# Altium footprint library TCA4307DGKR.PcbLib: 3 footprints
Each footprint in its own frame and in the unit in brackets; x right, y up, seen from the top. Pads: shape width x height; smd on the part's side, far side on the other; paste and mask are expansions set on the pad; w line width, h text height; cw(c..) or ccw(c..) is an arc to the next point about the centre after c.
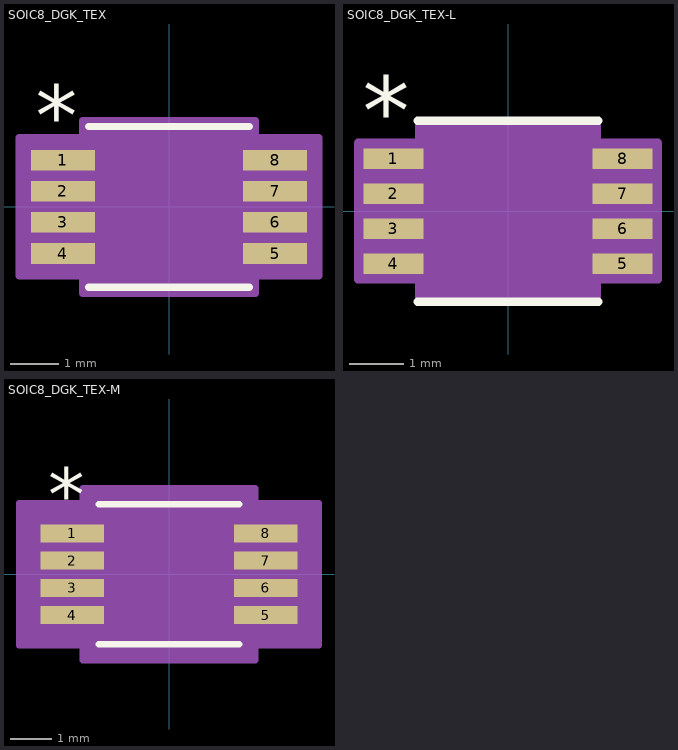
[diagram p0: the footprints below, top view; thin cyan lines are the x and y axes]

## SOIC8_DGK_TEX [mm]
pads (8):
  rect 1.328x0.431 smd paste+0 mask+0: 1(-2.213,0.975) 2(-2.213,0.325) 3(-2.213,-0.325) 4(-2.213,-0.975) 5(2.213,-0.975) 6(2.213,-0.325) 7(2.213,0.325) 8(2.213,0.975)
Top Overlay:
  lines w0.152: -1.676,-1.676 1.676,-1.676 ; -1.676,1.676 1.676,1.676
  text ".Designator" at -3.492,-0.635 h1.27
  text "*" at -2.785,1.279 h1.27
Mechanical 13:
  lines w0.025: -0.305,1.549 ccw(c0,1.549) 0.305,1.549 ; -2.527,-1.165 -2.527,-0.784 -1.549,-0.784 -1.549,-1.165 -2.527,-1.165 ; -2.527,-0.515 -2.527,-0.134 -1.549,-0.134 -1.549,-0.515 -2.527,-0.515 ; -2.527,0.134 -2.527,0.515 -1.549,0.515 -1.549,0.134 -2.527,0.134 ; -2.527,0.784 -2.527,1.165 -1.549,1.165 -1.549,0.784 -2.527,0.784 ; -1.549,-1.549 1.549,-1.549 1.549,1.549 -1.549,1.549 -1.549,-1.549 ; 1.549,-1.165 1.549,-0.784 2.527,-0.784 2.527,-1.165 1.549,-1.165 ; 1.549,-0.515 1.549,-0.134 2.527,-0.134 2.527,-0.515 1.549,-0.515 ; 1.549,0.134 1.549,0.515 2.527,0.515 2.527,0.134 1.549,0.134 ; 1.549,0.784 1.549,1.165 2.527,1.165 2.527,0.784 1.549,0.784
  text "*" at -1.486,0.203 h1.27
  text ".Designator" at -3.492,-0.635 h1.27
Mechanical 15:
  region: -1.803,-1.444 -3.131,-1.444 -3.131,1.444 -1.803,1.444 -1.803,1.803 1.803,1.803 1.803,1.444 3.131,1.444 3.131,-1.444 1.803,-1.444 1.803,-1.803 -1.803,-1.803
  lines w0.152: -3.131,-1.444 -3.131,1.444 -1.803,1.444 -1.803,1.803 1.803,1.803 1.803,1.444 3.131,1.444 3.131,-1.444 1.803,-1.444 1.803,-1.803 -1.803,-1.803 -1.803,-1.444 -3.131,-1.444
3D body "SOIC8_DGK_TEX.step": height 1.09, standoff 0, extent -2.527,-1.549 2.527,1.549

## SOIC8_DGK_TEX-L [mil]
pads (8):
  rect 43.75x15 smd paste+0 mask+0: 1(-83.53,38.38) 2(-83.53,12.79) 3(-83.53,-12.79) 4(-83.53,-38.38) 5(83.53,-38.38) 6(83.53,-12.79) 7(83.53,12.79) 8(83.53,38.38)
Top Overlay:
  lines w6: -66,-66 66,-66 ; -66,66 66,66
  text ".Designator" at -137.5,-25 h50
  text "*" at -106.03,48.38 h50
Mechanical 13:
  lines w1: -12,61 ccw(c0,61) 12,61 ; -99.5,-45.88 -99.5,-30.89 -61,-30.89 -61,-45.88 -99.5,-45.88 ; -99.5,-20.3 -99.5,-5.29 -61,-5.29 -61,-20.3 -99.5,-20.3 ; -99.5,5.29 -99.5,20.3 -61,20.3 -61,5.29 -99.5,5.29 ; -99.5,30.89 -99.5,45.88 -61,45.88 -61,30.89 -99.5,30.89 ; -61,-61 61,-61 61,61 -61,61 -61,-61 ; 61,-45.88 61,-30.89 99.5,-30.89 99.5,-45.88 61,-45.88 ; 61,-20.3 61,-5.29 99.5,-5.29 99.5,-20.3 61,-20.3 ; 61,5.29 61,20.3 99.5,20.3 99.5,5.29 61,5.29 ; 61,30.89 61,45.88 99.5,45.88 99.5,30.89 61,30.89
  text "*" at -58.5,8 h50
  text ".Designator" at -137.5,-25 h50
Mechanical 15:
  region: -65,-49.88 -109.41,-49.88 -109.41,49.88 -65,49.88 -65,65 65,65 65,49.88 109.41,49.88 109.41,-49.88 65,-49.88 65,-65 -65,-65
  lines w6: -109.41,-49.88 -109.41,49.88 -65,49.88 -65,65 65,65 65,49.88 109.41,49.88 109.41,-49.88 65,-49.88 65,-65 -65,-65 -65,-49.88 -109.41,-49.88
3D body "SOIC8_DGK_TEX.step": height 43.11, standoff 0, extent -99.49,-60.98 99.49,60.98

## SOIC8_DGK_TEX-M [mm]
pads (8):
  rect 1.528x0.431 smd paste+0 mask+0: 1(-2.313,0.975) 2(-2.313,0.325) 3(-2.313,-0.325) 4(-2.313,-0.975) 5(2.313,-0.975) 6(2.313,-0.325) 7(2.313,0.325) 8(2.313,0.975)
Top Overlay:
  lines w0.152: -1.676,-1.676 1.676,-1.676 ; -1.676,1.676 1.676,1.676
  text ".Designator" at -3.492,-0.635 h1.27
  text "*" at -2.885,1.279 h1.27
Mechanical 13:
  lines w0.025: -0.305,1.549 ccw(c0,1.549) 0.305,1.549 ; -2.527,-1.165 -2.527,-0.784 -1.549,-0.784 -1.549,-1.165 -2.527,-1.165 ; -2.527,-0.515 -2.527,-0.134 -1.549,-0.134 -1.549,-0.515 -2.527,-0.515 ; -2.527,0.134 -2.527,0.515 -1.549,0.515 -1.549,0.134 -2.527,0.134 ; -2.527,0.784 -2.527,1.165 -1.549,1.165 -1.549,0.784 -2.527,0.784 ; -1.549,-1.549 1.549,-1.549 1.549,1.549 -1.549,1.549 -1.549,-1.549 ; 1.549,-1.165 1.549,-0.784 2.527,-0.784 2.527,-1.165 1.549,-1.165 ; 1.549,-0.515 1.549,-0.134 2.527,-0.134 2.527,-0.515 1.549,-0.515 ; 1.549,0.134 1.549,0.515 2.527,0.515 2.527,0.134 1.549,0.134 ; 1.549,0.784 1.549,1.165 2.527,1.165 2.527,0.784 1.549,0.784
  text "*" at -1.486,0.203 h1.27
  text ".Designator" at -3.492,-0.635 h1.27
Mechanical 15:
  region: -2.057,-1.698 -3.585,-1.698 -3.585,1.698 -2.057,1.698 -2.057,2.057 2.057,2.057 2.057,1.698 3.585,1.698 3.585,-1.698 2.057,-1.698 2.057,-2.057 -2.057,-2.057
  lines w0.152: -3.585,-1.698 -3.585,1.698 -2.057,1.698 -2.057,2.057 2.057,2.057 2.057,1.698 3.585,1.698 3.585,-1.698 2.057,-1.698 2.057,-2.057 -2.057,-2.057 -2.057,-1.698 -3.585,-1.698
3D body "SOIC8_DGK_TEX.step": height 1.09, standoff 0, extent -2.527,-1.549 2.527,1.549